# Altium schematic symbol library RC0603FR-071KL.SchLib: 1 symbol
Pins are listed as number, name and electrical type; pins without a type are passive.

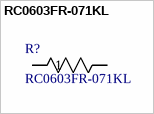
[diagram p0: symbol RC0603FR-071KL]

## RC0603FR-071KL
designator R?
RES SMD 1K OHM 1% 1/10W 0603; Manufacturer_Name: Yageo; Copyright: Copyright (C) 2025 Ultra Librarian. All rights reserved.; Manufacturer_Part_Number: RC0603FR-071KL
footprint RC0603N_YAG
pins: 1, 2